# Altium schematic symbol library NEXUS32.SchLib: 46 symbols
Pins are listed as number, name and electrical type; pins without a type are passive.

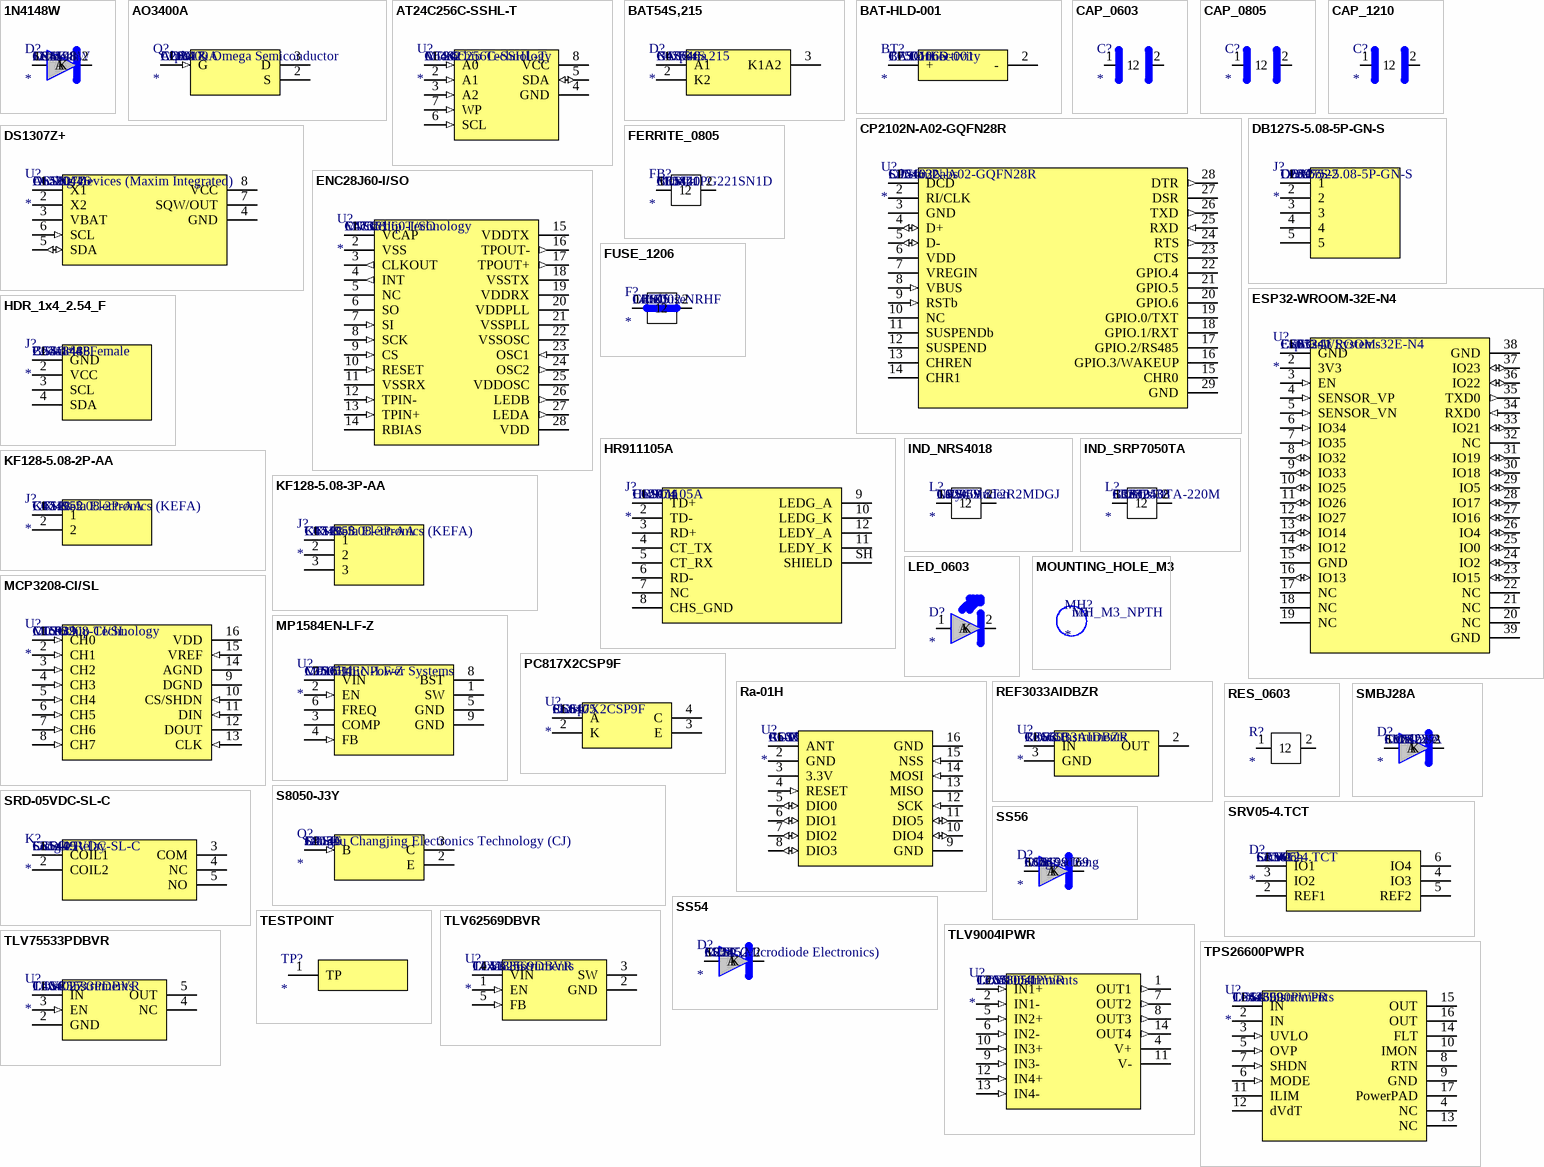
[diagram p0: symbols 1N4148W to TPS26600PWPR]

## 1N4148W
designator D?  Manufacturer: Semtech  Manufacturer Part Number: 1N4148W  Supplier 1: LCSC  Supplier Part Number 1: C81598
Diodo de conmutacion 75V 150mA SOD-123 (Semtech 1N4148W); LCSC Part #: C81598
footprint D_SOD-123
pins: 1 A, 2 K

## AO3400A
designator Q?  Manufacturer: Alpha & Omega Semiconductor  Manufacturer Part Number: AO3400A  Supplier 1: LCSC  Supplier Part Number 1: C20917
MOSFET canal N 30V 5.7A SOT-23 (Alpha and Omega AO3400A); LCSC Part #: C20917
footprint SOT-23-3_DBZ
pins: 1 G (in), 2 S, 3 D

## AT24C256C-SSHL-T
designator U?  Manufacturer: Microchip Technology  Manufacturer Part Number: AT24C256C-SSHL-T  Supplier 1: LCSC  Supplier Part Number 1: C6482
EEPROM I2C 256Kbit SOIC-8 (Microchip AT24C256C-SSHL-T); LCSC Part #: C6482
footprint SOIC-8_3.9x4.9_P1.27
pins: 1 A0 (in), 2 A1 (in), 3 A2 (in), 4 GND (power), 5 SDA (io), 6 SCL (in), 7 WP (in), 8 VCC (power)

## BAT54S,215
designator D?  Manufacturer: Nexperia  Manufacturer Part Number: BAT54S,215  Supplier 1: LCSC  Supplier Part Number 1: C47546
Doble diodo Schottky en serie 30V 200mA SOT-23 (Nexperia BAT54S,215); LCSC Part #: C47546
footprint SOT-23-3_DBZ
pins: 1 A1, 2 K2, 3 K1A2

## BAT-HLD-001
designator BT?  Manufacturer: TE Connectivity  Manufacturer Part Number: BAT-HLD-001  Supplier 1: LCSC  Supplier Part Number 1: C7501066
Portapilas CR2032 SMD (TE BAT-HLD-001); pad 1 = (+) dos pestanas laterales, pad 2 = (-) pad central; LCSC Part #: C7501066
footprint BAT-HLD-001
pins: 1 +, 2 -

## CAP_0603
designator C?
Condensador ceramico SMD 0603
footprint R_0603
pins: 1, 2

## CAP_0805
designator C?
Condensador ceramico SMD 0805
footprint C_0805
pins: 1, 2

## CAP_1210
designator C?
Condensador ceramico SMD 1210
footprint C_1210
pins: 1, 2

## CP2102N-A02-GQFN28R
designator U?  Manufacturer: Silicon Labs  Manufacturer Part Number: CP2102N-A02-GQFN28R  Supplier 1: LCSC  Supplier Part Number 1: C964632
Puente USB a UART QFN-28 5x5 (Silicon Labs CP2102N-A02-GQFN28R); LCSC Part #: C964632
footprint QFN-28-EP_5x5_P0.5
pins: 1 DCD, 2 RI/CLK, 3 GND (power), 4 D+ (io), 5 D- (io), 6 VDD (power), 7 VREGIN (power), 8 VBUS (in), 9 RSTb (in), 10 NC, 11 SUSPENDb, 12 SUSPEND, 13 CHREN, 14 CHR1, 15 CHR0, 16 GPIO.3/WAKEUP, 17 GPIO.2/RS485, 18 GPIO.1/RXT, 19 GPIO.0/TXT, 20 GPIO.6, 21 GPIO.5, 22 GPIO.4, 23 CTS, 24 RTS (out), 25 RXD (in), 26 TXD (out), 27 DSR, 28 DTR (out), 29 GND (power)

## DB127S-5.08-5P-GN-S
designator J?  Manufacturer: Dorabo  Manufacturer Part Number: DB127S-5.08-5P-GN-S  Supplier 1: LCSC  Supplier Part Number 1: C2997522
Bornera tornillo 5 polos paso 5.08mm (Dorabo DB127S-5.08-5P-GN-S); LCSC Part #: C2997522
footprint TB_DB127S-5.08-5P
pins: 1, 2, 3, 4, 5

## DS1307Z+
designator U?  Manufacturer: Analog Devices (Maxim Integrated)  Manufacturer Part Number: DS1307Z+  Supplier 1: LCSC  Supplier Part Number 1: C1520446
RTC I2C 64x8 SOIC-8 150mil (Analog Devices/Maxim DS1307Z+); LCSC Part #: C1520446
footprint SOIC-8_3.9x4.9_P1.27
pins: 1 X1, 2 X2, 3 VBAT (power), 4 GND (power), 5 SDA (io), 6 SCL (in), 7 SQW/OUT (oc), 8 VCC (power)

## ENC28J60-I/SO
designator U?  Manufacturer: Microchip Technology  Manufacturer Part Number: ENC28J60-I/SO  Supplier 1: LCSC  Supplier Part Number 1: C47351
Controlador Ethernet 10BASE-T SPI SOIC-28 (Microchip ENC28J60-I/SO); LCSC Part #: C47351
footprint SOIC-28W_7.5x17.9_P1.27
pins: 1 VCAP, 2 VSS (power), 3 CLKOUT (out), 4 INT (out), 5 NC, 6 SO (hiz), 7 SI (in), 8 SCK (in), 9 CS (in), 10 RESET (in), 11 VSSRX (power), 12 TPIN- (in), 13 TPIN+ (in), 14 RBIAS, 15 VDDTX (power), 16 TPOUT- (out), 17 TPOUT+ (out), 18 VSSTX (power), 19 VDDRX (power), 20 VDDPLL (power), 21 VSSPLL (power), 22 VSSOSC (power), 23 OSC1 (in), 24 OSC2 (out), 25 VDDOSC (power), 26 LEDB (out), 27 LEDA (out), 28 VDD (power)

## ESP32-WROOM-32E-N4
designator U?  Manufacturer: Espressif Systems  Manufacturer Part Number: ESP32-WROOM-32E-N4  Supplier 1: LCSC  Supplier Part Number 1: C701341
Modulo WiFi/BT ESP32-WROOM-32E-N4 (Espressif), 38 pines + pad GND; LCSC Part #: C701341
footprint ESP32-WROOM-32E
pins: 1 GND (power), 2 3V3 (power), 3 EN (in), 4 SENSOR_VP (in), 5 SENSOR_VN (in), 6 IO34 (in), 7 IO35 (in), 8 IO32 (io), 9 IO33 (io), 10 IO25 (io), 11 IO26 (io), 12 IO27 (io), 13 IO14 (io), 14 IO12 (io), 15 GND (power), 16 IO13 (io), 17 NC, 18 NC, 19 NC, 20 NC, 21 NC, 22 NC, 23 IO15 (io), 24 IO2 (io), 25 IO0 (io), 26 IO4 (io), 27 IO16 (io), 28 IO17 (io), 29 IO5 (io), 30 IO18 (io), 31 IO19 (io), 32 NC, 33 IO21 (io), 34 RXD0 (in), 35 TXD0 (out), 36 IO22 (io), 37 IO23 (io), 38 GND (power), 39 GND (power)

## FERRITE_0805
designator FB?  Manufacturer: Murata  Manufacturer Part Number: BLM21PG221SN1D  Supplier 1: LCSC  Supplier Part Number 1: C85840
Ferrita 220R@100MHz 0805 (Murata BLM21PG221SN1D); LCSC Part #: C85840
footprint FB_0805
pins: 1, 2

## FUSE_1206
designator F?  Manufacturer: Littelfuse  Manufacturer Part Number: 0466002.NRHF  Supplier 1: LCSC  Supplier Part Number 1: C3105
Fusible SMD 1206 2A 63V (Littelfuse 0466002.NRHF); LCSC Part #: C3105
footprint F_1206
pins: 1, 2

## HDR_1x4_2.54_F
designator J?  Manufacturer: Boomele  Manufacturer Part Number: 2.54-1*4PFemale  Supplier 1: LCSC  Supplier Part Number 1: C2718488
Cabezal hembra 1x4 paso 2.54mm para modulo OLED I2C (Boomele 2.54-1*4PFemale); orden GND-VCC-SCL-SDA (a confirmar con el modulo real); LCSC Part #: C2718488
footprint HDR_1x4_P2.54_F
pins: 1 GND, 2 VCC, 3 SCL, 4 SDA

## HR911105A
designator J?  Manufacturer: HanRun  Manufacturer Part Number: HR911105A  Supplier 1: LCSC  Supplier Part Number 1: C12074
RJ45 con magneticos 1CT:1CT y 2 LED, 10/100 (HanRun HR911105A); P8 = CHS GND; LED verde 9(A)-10(K), amarillo 12(A)-11(K); LCSC Part #: C12074
footprint RJ45_HR911105A
pins: 1 TD+, 2 TD-, 3 RD+, 4 CT_TX, 5 CT_RX, 6 RD-, 7 NC, 8 CHS_GND, 9 LEDG_A, 10 LEDG_K, 11 LEDY_K, 12 LEDY_A, SH SHIELD

## IND_NRS4018
designator L?  Manufacturer: Taiyo Yuden  Manufacturer Part Number: NRS4018T2R2MDGJ  Supplier 1: LCSC  Supplier Part Number 1: C92959
Inductor de potencia 2.2uH 4x4mm (Taiyo Yuden NRS4018T2R2MDGJ); LCSC Part #: C92959
footprint L_NRS4018
pins: 1, 2

## IND_SRP7050TA
designator L?  Manufacturer: Bourns  Manufacturer Part Number: SRP7050TA-220M  Supplier 1: LCSC  Supplier Part Number 1: C1332438
Inductor de potencia 22uH 7.3x6.6mm (Bourns SRP7050TA-220M); LCSC Part #: C1332438
footprint L_SRP7050TA
pins: 1, 2

## KF128-5.08-2P-AA
designator J?  Manufacturer: Cixi Kefa Electronics (KEFA)  Manufacturer Part Number: KF128-5.08-2P-AA  Supplier 1: LCSC  Supplier Part Number 1: C474952
Bornera tornillo 2 polos paso 5.08mm (Cixi Kefa KF128-5.08-2P-AA); LCSC Part #: C474952
footprint TB_KF128-5.08-2P
pins: 1, 2

## KF128-5.08-3P-AA
designator J?  Manufacturer: Cixi Kefa Electronics (KEFA)  Manufacturer Part Number: KF128-5.08-3P-AA  Supplier 1: LCSC  Supplier Part Number 1: C474953
Bornera tornillo 3 polos paso 5.08mm (Cixi Kefa KF128-5.08-3P-AA); LCSC Part #: C474953
footprint TB_KF128-5.08-3P
pins: 1, 2, 3

## LED_0603
designator D?
LED SMD 0603
footprint LED_0603
pins: 1 A, 2 K

## MCP3208-CI/SL
designator U?  Manufacturer: Microchip Technology  Manufacturer Part Number: MCP3208-CI/SL  Supplier 1: LCSC  Supplier Part Number 1: C16939
ADC 12 bits 8 canales SPI SOIC-16 (Microchip MCP3208-CI/SL); LCSC Part #: C16939
footprint SOIC-16_3.9x9.9_P1.27
pins: 1 CH0 (in), 2 CH1 (in), 3 CH2 (in), 4 CH3 (in), 5 CH4 (in), 6 CH5 (in), 7 CH6 (in), 8 CH7 (in), 9 DGND (power), 10 CS/SHDN (in), 11 DIN (in), 12 DOUT (hiz), 13 CLK (in), 14 AGND (power), 15 VREF (in), 16 VDD (power)

## MOUNTING_HOLE_M3
designator MH?  Manufacturer Part Number: MH_M3_NPTH
Agujero de montaje M3 NPTH (sin pines, sin red); Manufacturer: n/a
footprint MH_M3

## MP1584EN-LF-Z
designator U?  Manufacturer: Monolithic Power Systems  Manufacturer Part Number: MP1584EN-LF-Z  Supplier 1: LCSC  Supplier Part Number 1: C15051
Reductor 3A 28V 1.5MHz SOIC8E con pad expuesto (MPS MP1584EN-LF-Z); LCSC Part #: C15051
footprint SOIC-8-EP_MP1584
pins: 1 SW, 2 EN (in), 3 COMP, 4 FB (in), 5 GND (power), 6 FREQ, 7 VIN (power), 8 BST, 9 GND (power)

## PC817X2CSP9F
designator U?  Manufacturer: Sharp  Manufacturer Part Number: PC817X2CSP9F  Supplier 1: LCSC  Supplier Part Number 1: C66405
Optoacoplador fototransistor 5kV SMD-4 (Sharp PC817X2CSP9F); LCSC Part #: C66405
footprint SOP-4_PC817X_L10.16
pins: 1 A, 2 K, 3 E, 4 C

## Ra-01H
designator U?  Manufacturer: Ai-Thinker  Manufacturer Part Number: Ra-01H  Supplier 1: LCSC  Supplier Part Number 1: C503593
Modulo LoRa SX1276 803-930MHz SMD-16 (Ai-Thinker Ra-01H); LCSC Part #: C503593
footprint MODULE_Ra-01H
pins: 1 ANT, 2 GND (power), 3 3.3V (power), 4 RESET (in), 5 DIO0 (io), 6 DIO1 (io), 7 DIO2 (io), 8 DIO3 (io), 9 GND (power), 10 DIO4 (io), 11 DIO5 (io), 12 SCK (in), 13 MISO (hiz), 14 MOSI (in), 15 NSS (in), 16 GND (power)

## REF3033AIDBZR
designator U?  Manufacturer: Texas Instruments  Manufacturer Part Number: REF3033AIDBZR  Supplier 1: LCSC  Supplier Part Number 1: C36658
Referencia de tension 3.3V 0.2% SOT-23-3 (TI REF3033AIDBZR); LCSC Part #: C36658
footprint SOT-23-3_DBZ
pins: 1 IN (power), 2 OUT (power), 3 GND (power)

## RES_0603
designator R?
Resistencia SMD 0603
footprint R_0603
pins: 1, 2

## S8050-J3Y
designator Q?  Manufacturer: Jiangsu Changjing Electronics Technology (CJ)  Manufacturer Part Number: S8050  Supplier 1: LCSC  Supplier Part Number 1: C2146
Transistor NPN 25V 500mA SOT-23 (Changjing S8050 J3Y); LCSC Part #: C2146
footprint SOT-23-3_DBZ
pins: 1 B (in), 2 E, 3 C

## SMBJ28A
designator D?  Manufacturer: Littelfuse  Manufacturer Part Number: SMBJ28A  Supplier 1: LCSC  Supplier Part Number 1: C178227
TVS unidireccional 28V 600W SMB (Littelfuse SMBJ28A); LCSC Part #: C178227
footprint D_SMB
pins: 1 A, 2 K

## SRD-05VDC-SL-C
designator K?  Manufacturer: Songle Relay  Manufacturer Part Number: SRD-05VDC-SL-C  Supplier 1: LCSC  Supplier Part Number 1: C35449
Rele SPDT 5V bobina 70 ohm (Songle SRD-05VDC-SL-C); 1-2 bobina, 3 COM, 4 NC, 5 NO; LCSC Part #: C35449
footprint RELAY_SRD-05VDC-SL-C
pins: 1 COIL1, 2 COIL2, 3 COM, 4 NC, 5 NO

## SRV05-4.TCT
designator D?  Manufacturer: Semtech  Manufacturer Part Number: SRV05-4.TCT  Supplier 1: LCSC  Supplier Part Number 1: C13612
Matriz TVS 4 lineas 5V SOT-23-6 (Semtech SRV05-4.TCT); LCSC Part #: C13612
footprint SOT-23-6_SRV05-4
pins: 1 IO1, 2 REF1 (power), 3 IO2, 4 IO3, 5 REF2, 6 IO4

## SS54
designator D?  Manufacturer: MDD (Microdiode Electronics)  Manufacturer Part Number: SS54  Supplier 1: LCSC  Supplier Part Number 1: C22452
Diodo Schottky 40V 5A SMA (MDD SS54); LCSC Part #: C22452
footprint D_SMA
pins: 1 A, 2 K

## SS56
designator D?  Manufacturer: hongjiacheng  Manufacturer Part Number: SS56  Supplier 1: LCSC  Supplier Part Number 1: C18199169
Diodo Schottky 60V 5A SMA (SS56); LCSC Part #: C18199169
footprint D_SMA
pins: 1 A, 2 K

## TESTPOINT
designator TP?
Punto de prueba, pad desnudo de 1.5mm sin montaje
footprint TP_PAD_1.5mm
pins: 1 TP

## TLV9004IPWR
designator U?  Manufacturer: Texas Instruments  Manufacturer Part Number: TLV9004IPWR  Supplier 1: LCSC  Supplier Part Number 1: C2058050
Amplificador operacional cuadruple RRIO 1MHz TSSOP-14 (TI TLV9004IPWR); LCSC Part #: C2058050
footprint TSSOP-14_PW_P0.65
pins: 1 OUT1 (out), 2 IN1- (in), 3 IN1+ (in), 4 V+ (power), 5 IN2+ (in), 6 IN2- (in), 7 OUT2 (out), 8 OUT3 (out), 9 IN3- (in), 10 IN3+ (in), 11 V- (power), 12 IN4+ (in), 13 IN4- (in), 14 OUT4 (out)

## TLV62569DBVR
designator U?  Manufacturer: Texas Instruments  Manufacturer Part Number: TLV62569DBVR  Supplier 1: LCSC  Supplier Part Number 1: C141836
Reductor sincrono 2A 2.5-5.5V SOT-23-5 (TI TLV62569DBVR); LCSC Part #: C141836
footprint SOT-23-5_DBV
pins: 1 EN (in), 2 GND (power), 3 SW, 4 VIN (power), 5 FB (in)

## TLV75533PDBVR
designator U?  Manufacturer: Texas Instruments  Manufacturer Part Number: TLV75533PDBVR  Supplier 1: LCSC  Supplier Part Number 1: C404027
LDO 500mA 3.3V SOT-23-5 (TI TLV75533PDBVR); LCSC Part #: C404027
footprint SOT-23-5_DBV
pins: 1 IN (power), 2 GND (power), 3 EN (in), 4 NC, 5 OUT (power)

## TPS26600PWPR
designator U?  Manufacturer: Texas Instruments  Manufacturer Part Number: TPS26600PWPR  Supplier 1: LCSC  Supplier Part Number 1: C544399
eFuse 4.2-60V, OVP/UVLO ajustables, HTSSOP-16 PowerPAD (TI TPS26600PWPR); LCSC Part #: C544399
footprint HTSSOP-16-EP_PWP_P0.65
pins: 1 IN (power), 2 IN (power), 3 UVLO (in), 4 NC, 5 OVP (in), 6 MODE (in), 7 SHDN (in), 8 RTN (power), 9 GND (power), 10 IMON, 11 ILIM, 12 dVdT, 13 NC, 14 FLT (oc), 15 OUT (power), 16 OUT (power), 17 PowerPAD (power)

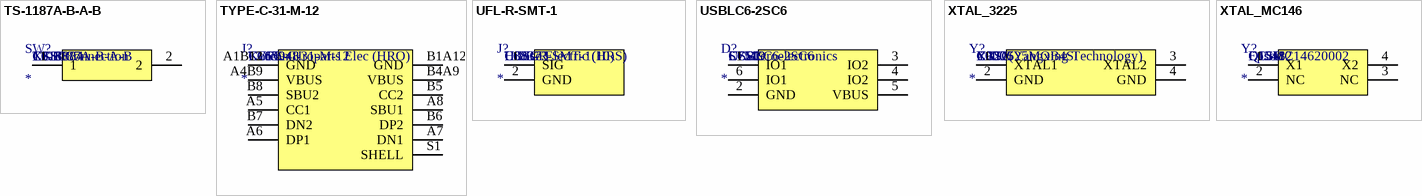
[diagram p1: symbols TS-1187A-B-A-B to XTAL_MC146]

## TS-1187A-B-A-B
designator SW?  Manufacturer: XKB Connection  Manufacturer Part Number: TS-1187A-B-A-B  Supplier 1: LCSC  Supplier Part Number 1: C318884
Pulsador tactil SMD 5.1x5.1 (XKB TS-1187A-B-A-B); pads A-B unidos (1) y C-D unidos (2); LCSC Part #: C318884
footprint SW_TS-1187A
pins: 1, 2

## TYPE-C-31-M-12
designator J?  Manufacturer: Korean Hroparts Elec (HRO)  Manufacturer Part Number: TYPE-C-31-M-12  Supplier 1: LCSC  Supplier Part Number 1: C165948
Receptaculo USB Type-C 16 pines SMD (HRO TYPE-C-31-M-12); pads fusionados A1/B12, A4/B9, B4/A9, B1/A12; LCSC Part #: C165948
footprint USB-C_TYPE-C-31-M-12
pins: A1B12 GND, A4B9 VBUS, A5 CC1, A6 DP1, A7 DN1, A8 SBU1, B1A12 GND, B4A9 VBUS, B5 CC2, B6 DP2, B7 DN2, B8 SBU2, S1 SHELL

## UFL-R-SMT-1
designator J?  Manufacturer: Hirose Electric (HRS)  Manufacturer Part Number: U.FL-R-SMT-1(10)  Supplier 1: LCSC  Supplier Part Number 1: C88373
Conector coaxial U.FL receptaculo SMD (Hirose U.FL-R-SMT-1(10)); 1 = senal, 2 = GND (2 pads); LCSC Part #: C88373
footprint UFL_R_SMT_1
pins: 1 SIG, 2 GND

## USBLC6-2SC6
designator D?  Manufacturer: STMicroelectronics  Manufacturer Part Number: USBLC6-2SC6  Supplier 1: LCSC  Supplier Part Number 1: C7519
Proteccion ESD USB 2 lineas + VBUS SOT-23-6 (ST USBLC6-2SC6); LCSC Part #: C7519
footprint SOT-23-6_USBLC6
pins: 1 IO1, 2 GND (power), 3 IO2, 4 IO2, 5 VBUS, 6 IO1

## XTAL_3225
designator Y?  Manufacturer: YXC (Yangxing Technology)  Manufacturer Part Number: X322525MOB4SI  Supplier 1: LCSC  Supplier Part Number 1: C9006
Cristal 25MHz 12pF SMD 3225 4 pads (YXC X322525MOB4SI); terminales 1 y 3, carcasa 2 y 4 a GND; LCSC Part #: C9006
footprint XTAL_3225_4P
pins: 1 XTAL1, 2 GND, 3 XTAL2, 4 GND

## XTAL_MC146
designator Y?  Manufacturer: Epson  Manufacturer Part Number: Q13MC14620002  Supplier 1: LCSC  Supplier Part Number 1: C15482
Cristal 32.768kHz 12.5pF MC-146 (Epson Q13MC14620002); terminales #1 y #4, #2/#3 sin conexion; LCSC Part #: C15482
footprint XTAL_MC-146
pins: 1 X1, 2 NC, 3 NC, 4 X2